# Altium footprint library TitansLib.PcbLib: 333 footprints (part 14 of 21)
Each footprint in its own frame and in the unit in brackets; x right, y up, seen from the top. Pads: shape width x height; smd on the part's side, far side on the other; paste and mask are expansions set on the pad; w line width, h text height; cw(c..) or ccw(c..) is an arc to the next point about the centre after c.
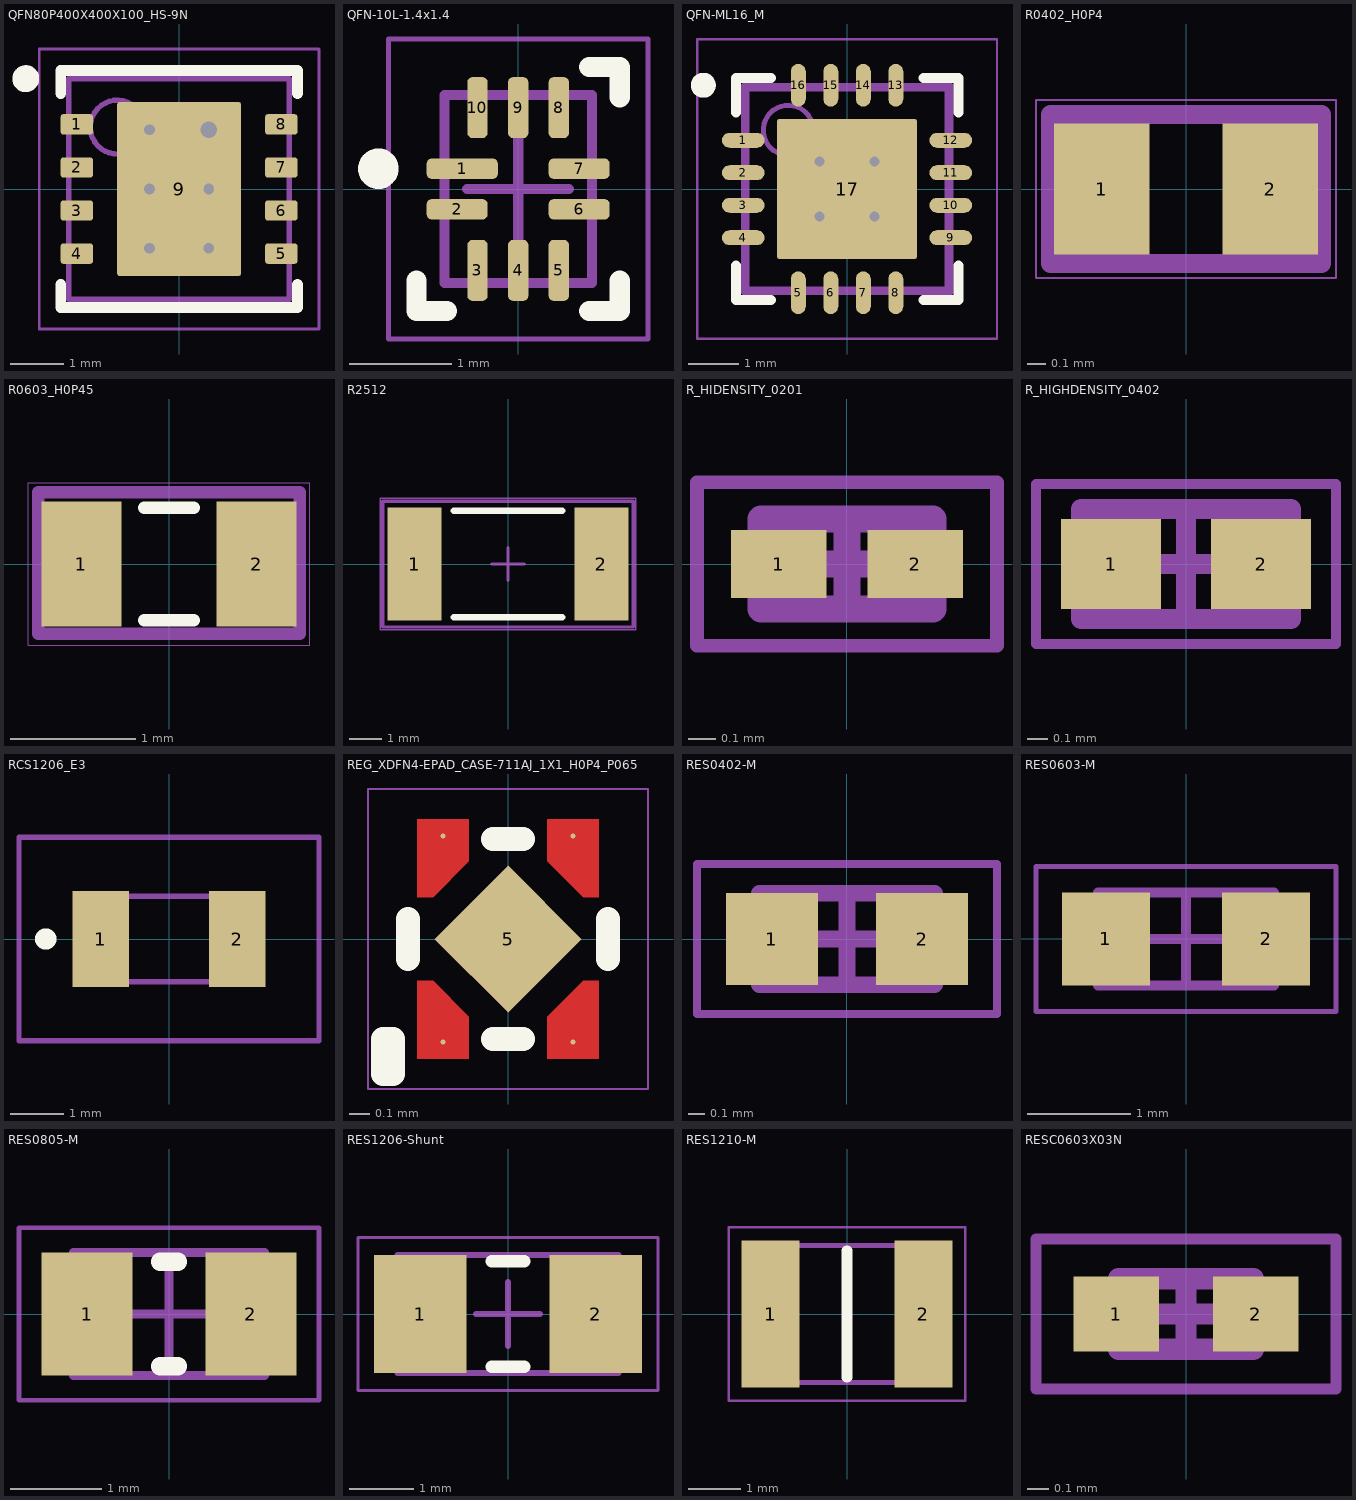
[diagram p13: the footprints below, top view; thin cyan lines are the x and y axes]

## QFN80P400X400X100_HS-9N [mm] "QFN, 8-Leads, Body 4.00x4.00mm, Pitch 0.80mm, Thermal Pad 2.18x3.03mm, IPC Medium Density"
height 1
pads (9):
  rrect26% 0.6x0.38 smd mask+0.05: 1(-1.9,1.2) 2(-1.9,0.4) 3(-1.9,-0.4) 4(-1.9,-1.2) 5(1.9,-1.2) 6(1.9,-0.4) 7(1.9,0.4) 8(1.9,1.2)
  rrect4% 2.3x3.24 smd mask+0.05: 9(0,0)
via 0.55,-1.1 diameter 0.4 hole 0.2
via -0.55,-1.1 diameter 0.4 hole 0.2
via 0.55,0 diameter 0.4 hole 0.2
via -0.55,0 diameter 0.4 hole 0.2
via 0.55,1.1 diameter 0.5 hole 0.3
via -0.55,1.1 diameter 0.4 hole 0.2
Top Overlay:
  circle w0.25: c-2.85,2.05 r0.125
  lines w0.2: -2.2,-1.775 -2.2,-2.2 2.2,-2.2 2.2,-1.775 ; -2.2,1.775 -2.2,2.2 2.2,2.2 2.2,1.775
Top Courtyard:
  lines w0.05: -2.6,-2.6 2.6,-2.6 2.6,2.6 -2.6,2.6 -2.6,-2.6
  lines w0.1: -0.5,0 0.5,0 ; 0,-0.5 0,0.5
Top Assembly:
  circle w0.1: c-1.15,1.15 r0.5
  lines w0.1: -2.05,-2.05 2.05,-2.05 2.05,2.05 -2.05,2.05 -2.05,-2.05
3D body "QFN80P400X400X100_HS-9N.step": height 1, standoff 0, extent -2.06,-2.05 2.06,2.05

## QFN-10L-1.4x1.4 [mm] "QFN, 10-Leads, Body 1.40x1.80mm, Pitch 0.40mm, IPC Medium Density"
height 0.55
pads (10):
  rrect50% 0.7x0.2 smd mask+0.05: 1(-0.55,0.2)
  rrect50% 0.6x0.2 smd mask+0.05: 2(-0.6,-0.2) 6(0.6,-0.2) 7(0.6,0.2)
  rrect50% 0.2x0.6 smd mask+0.05: 3(-0.4,-0.8) 4(0,-0.8) 5(0.4,-0.8) 8(0.4,0.8) 9(0,0.8) 10(-0.4,0.8)
Top Overlay:
  circle w0.2: c-1.375,0.2 r0.1
  lines w0.2: -1,-0.9 -1,-1.2 -0.7,-1.2 ; 0.7,-1.2 1,-1.2 1,-0.9 ; 0.7,1.2 1,1.2 1,0.9
Top Courtyard:
  lines w0.05: -1.275,-1.475 -1.275,1.475 1.275,1.475 1.275,-1.475 -1.275,-1.475
  lines w0.1: -0.5,0 0.5,0 ; 0,-0.5 0,0.5
Top Assembly:
  lines w0.1: -0.725,-0.925 -0.725,0.925 0.725,0.925 0.725,-0.925 -0.725,-0.925
  text ".Designator" at -0.621,-0.262 h1
3D body "QFN40P140X180X55-10N.step": height 0.55, standoff 0, extent -0.775,-0.975 0.775,0.975

## QFN-ML16_M [mm] "QFN, 16-Leads, Body 4x4mm, Pitch 0.65mm, Thermal Pad 2.8x2.8mm, IPC Low Density"
height 1
pads (17):
  oval 0.85x0.3 smd: 1(-2.075,0.975) 2(-2.075,0.325) 3(-2.075,-0.325) 4(-2.075,-0.975) 9(2.075,-0.975) 10(2.075,-0.325) 11(2.075,0.325) 12(2.075,0.975)
  oval 0.3x0.85 smd: 5(-0.975,-2.075) 6(-0.325,-2.075) 7(0.325,-2.075) 8(0.975,-2.075) 13(0.975,2.075) 14(0.325,2.075) 15(-0.325,2.075) 16(-0.975,2.075)
  rrect3% 2.8x2.8 smd: 17(0,0)
via 0.55,-0.55 diameter 0.5 hole 0.2
via -0.55,-0.55 diameter 0.5 hole 0.2
via 0.55,0.55 diameter 0.5 hole 0.2
via -0.55,0.55 diameter 0.5 hole 0.2
Top Overlay:
  circle w0.25: c-2.875,2.075 r0.125
  lines w0.2: -2.225,-1.525 -2.225,-2.225 -1.525,-2.225 ; -2.225,1.525 -2.225,2.225 -1.525,2.225 ; 1.525,-2.225 2.225,-2.225 2.225,-1.525 ; 1.525,2.225 2.225,2.225 2.225,1.525
Top Assembly:
  lines w0.1: -1.998,-1.998 -1.998,1.998 1.998,1.998 1.998,-1.998 -1.998,-1.998
  text ".Designator" at -1.662,-0.078 h1
Mechanical 13:
  circle w0.1: c-1.175,1.175 r0.5
  lines w0.1: -2.075,-2.075 2.075,-2.075 2.075,2.075 -2.075,2.075 -2.075,-2.075
Mechanical 15:
  lines w0.05: -3,-3 3,-3 3,3 -3,3 -3,-3
  lines w0.1: -0.5,0 0.5,0 ; 0,-0.5 0,0.5
3D body: height 1, standoff 0, extent -2.075,-2.075 2.075,2.075

## R0402_H0P4 [mm]
pads (2):
  rect 0.51x0.7 smd mask+0.05: 1(-0.45,0) 2(0.45,0)
Top Courtyard:
  lines w0.01: -0.8,-0.475 0.8,-0.475 0.8,0.475 -0.8,0.475 -0.8,-0.475
Top Assembly:
  lines w0.1: -0.723,-0.398 0.723,-0.398 0.723,0.398 -0.723,0.398 -0.723,-0.398
  text ".Designator" at -0.701,-0.277 h1
3D body "R0402.STEP": height 0.34, standoff 0, extent -0.52,-0.3 0.52,0.3

## R0603_H0P45 [mm]
pads (2):
  rect 0.64x1 smd mask+0.05: 1(-0.7,0) 2(0.7,0)
Top Overlay:
  lines w0.1: -0.2,-0.45 0.2,-0.45 ; -0.2,0.45 0.2,0.45
Top Courtyard:
  lines w0.01: -1.125,-0.65 -1.125,0.65 1.125,0.65 1.125,-0.65 -1.125,-0.65
Top Assembly:
  lines w0.1: -1.048,-0.557 -1.048,0.573 1.048,0.573 1.048,-0.557 -1.048,-0.557
  text ".Designator" at -0.912,-0.335 h1
3D body "R0603.STEP": height 0.56, standoff 0, extent -0.85,-0.4 0.85,0.4

## R2512 [mm] "Chip Resistor, 2-Leads, Body 6.35x3.18mm, IPC Medium Density"
height 0.89
pads (2):
  rect 1.65x3.45 smd: 1(-2.85,0) 2(2.85,0)
Top Overlay:
  lines w0.2: -1.65,-1.625 1.65,-1.625 ; -1.65,1.625 1.65,1.625
Top Courtyard:
  lines w0.05: -3.9,-2 3.9,-2 3.9,2 -3.9,2 -3.9,-2
  lines w0.1: -0.5,0 0.5,0 ; 0,-0.5 0,0.5
Top Assembly:
  lines w0.1: -3.823,-1.923 3.823,-1.923 3.823,1.91 -3.823,1.91 -3.823,-1.923
  text ".Designator" at -2.025,-0.205 h1
3D body "WSL2512 (0.007 to 0.5).stp": height 0.64, standoff 0, extent -3.175,-1.59 3.175,1.59

## R_HIDENSITY_0201 [mm]
height 0.26
pads (2):
  rect 0.35x0.25 smd: 1(-0.25,0) 2(0.25,0)
Top Courtyard:
  lines w0.05: -0.55,-0.3 -0.55,0.3 0.55,0.3 0.55,-0.3 -0.55,-0.3
  lines w0.1: -0.165,0 0.165,0 ; 0,-0.165 0,0.165
Top Assembly:
  lines w0.1: -0.315,-0.165 -0.315,0.165 0.315,0.165 0.315,-0.165 -0.315,-0.165
3D body "Chip2PinSM127P600-8N.step": height 0.26, standoff 0, extent -0.315,-0.165 0.315,0.165

## R_HIGHDENSITY_0402 [mm]
height 0.4
pads (2):
  rect 0.5x0.45 smd: 1(-0.375,0) 2(0.375,0)
Top Courtyard:
  lines w0.05: -0.75,-0.4 0.75,-0.4 0.75,0.4 -0.75,0.4 -0.75,-0.4
  lines w0.1: -0.275,0 0.275,0 ; 0,-0.275 0,0.275
Top Assembly:
  lines w0.1: -0.525,-0.275 0.525,-0.275 0.525,0.275 -0.525,0.275 -0.525,-0.275
3D body "R_HIGHDENSITY_0402.step": height 0.4, standoff 0, extent -0.525,-0.275 0.525,0.275

## RCS1206_E3 [mm]
pads (2):
  rect 1.05x1.8 smd: 1(-1.275,0) 2(1.275,0)
Top Overlay:
  lines w0.2: -2.3,-0.1 ccw(c-2.3,0) -2.3,0.1 ccw(c-2.3,0) -2.3,-0.1
Mechanical 13:
  lines w0.1: -1.575,-0.8 -1.575,0.8 1.575,0.8 1.575,-0.8 -1.575,-0.8
Mechanical 15:
  lines w0.1: -2.8,-1.9 -2.8,1.9 2.8,1.9 2.8,-1.9 -2.8,-1.9
3D body "RCS120639R0FKEA.stp": height 0.55, standoff 0, extent -1.6,-0.8 1.6,0.8

## REG_XDFN4-EPAD_CASE-711AJ_1X1_H0P4_P065 [mm] "MCD-01613"
height 0.43
pads (5):
  round 0.025 smd paste+0 mask+0.038: 1(-0.325,-0.515) 2(0.325,-0.515) 3(0.325,0.515) 4(-0.325,0.515)
  rect 0.52x0.52 smd rot 45 paste+0 mask+0.038: 5(0,0)
Top Layer:
  region: -0.455,0.6 -0.195,0.6 -0.195,0.39 -0.375,0.21 -0.455,0.21
  region: 0.455,0.6 0.195,0.6 0.195,0.39 0.375,0.21 0.455,0.21
  region: 0.455,-0.6 0.195,-0.6 0.195,-0.39 0.375,-0.21 0.455,-0.21
  region: -0.455,-0.6 -0.195,-0.6 -0.195,-0.39 -0.375,-0.21 -0.455,-0.21
Top Overlay:
  lines w0.12: -0.5,-0.1 -0.5,0.1 ; -0.075,-0.5 0.075,-0.5 ; -0.075,0.5 0.075,0.5 ; 0.5,-0.1 0.5,0.1 ; -0.625,-0.675 -0.575,-0.675 -0.575,-0.5 -0.625,-0.5 -0.625,-0.675
Top Courtyard:
  lines w0.01: -0.7,-0.75 -0.7,0.75 0.7,0.75 0.7,-0.75 -0.7,-0.75
3D body: height 0.43, standoff 0, extent -0.5,-0.5 0.5,0.5
3D body "XDFN4-711AJ.STEP": height 0.36, standoff -0.03, extent -0.5,-0.502 0.5,0.502
3D body: height 0.37, standoff 0.36, extent -0.47,-0.47 -0.23,-0.23
3D body: height 0.44, standoff 0.43, extent -0.445,-0.445 -0.205,-0.205

## RES0402-M [mm] "Chip Resistor, 2-Leads, Body 1.00x0.50mm, IPC Medium Density"
height 0.35
pads (2):
  rect 0.55x0.55 smd mask+0.051: 1(-0.45,0) 2(0.45,0)
Top Courtyard:
  lines w0.05: -0.9,-0.45 -0.9,0.45 0.9,0.45 0.9,-0.45 -0.9,-0.45
  lines w0.1: -0.275,0 0.275,0 ; 0,-0.275 0,0.275
Top Designator:
  text ".Designator" at -4.818,-0.496 h2.5
Mechanical 13:
  lines w0.1: -0.525,-0.275 -0.525,0.275 0.525,0.275 0.525,-0.275 -0.525,-0.275
3D body "RES0402-M.step": height 0.35, standoff 0, extent -0.525,-0.275 0.525,0.275

## RES0603-M [mm] "Chip Resistor, 2-Leads, Body 1.60x0.80mm, IPC Medium Density"
height 0.45
pads (2):
  rect 0.85x0.9 smd mask+0.051: 1(-0.775,0) 2(0.775,0)
Top Courtyard:
  lines w0.05: -1.45,-0.7 1.45,-0.7 1.45,0.7 -1.45,0.7 -1.45,-0.7
  lines w0.1: -0.45,0 0.45,0 ; 0,-0.45 0,0.45
Mechanical 13:
  lines w0.1: -0.85,-0.45 0.85,-0.45 0.85,0.45 -0.85,0.45 -0.85,-0.45
3D body "RES0603-M.step": height 0.45, standoff 0, extent -0.85,-0.45 0.85,0.45

## RES0805-M [mm] "Chip Resistor, 2-Leads, Body 2.00x1.25mm, IPC Medium Density"
height 0.6
pads (2):
  rect 1x1.35 smd mask+0.05: 1(-0.9,0) 2(0.9,0)
Top Overlay:
  lines w0.2: -0.1,-0.575 0.1,-0.575 ; -0.1,0.575 0.1,0.575
Top Courtyard:
  lines w0.05: -1.65,-0.95 1.65,-0.95 1.65,0.95 -1.65,0.95 -1.65,-0.95
  lines w0.1: -0.5,0 0.5,0 ; 0,-0.5 0,0.5
Top Assembly:
  lines w0.1: -1.05,-0.675 1.05,-0.675 1.05,0.675 -1.05,0.675 -1.05,-0.675
3D body "RESC2012X06N.step": height 0.6, standoff 0, extent -1.05,-0.675 1.05,0.675

## RES1206-Shunt [mm] "Chip Resistor, 2-Leads, Body 3.20x1.60mm, IPC Medium Density"
height 0.85
pads (2):
  rect 1.45x1.85 smd mask+0.05: 1(-1.375,0) 2(1.375,0)
Top Overlay:
  lines w0.2: -0.25,-0.825 0.25,-0.825 ; -0.25,0.825 0.25,0.825
Top Courtyard:
  lines w0.05: -2.35,-1.2 2.35,-1.2 2.35,1.2 -2.35,1.2 -2.35,-1.2
  lines w0.1: -0.5,0 0.5,0 ; 0,-0.5 0,0.5
Top Assembly:
  lines w0.1: -1.725,-0.925 1.725,-0.925 1.725,0.925 -1.725,0.925 -1.725,-0.925
3D body "RESC3216X08N.step": height 0.85, standoff 0, extent -1.725,-0.925 1.725,0.925

## RES1210-M [mm]
pads (2):
  rect 1.1x2.8 smd: 1(-1.45,0) 2(1.45,0)
Top Overlay:
  lines w0.2: 0,-1.2 0,1.2
Mechanical 13:
  lines w0.1: -1.55,-1.3 -1.55,1.3 1.55,1.3 1.55,-1.3 -1.55,-1.3
Mechanical 15:
  lines w0.05: -2.25,-1.65 -2.25,1.65 2.25,1.65 2.25,-1.65 -2.25,-1.65
3D body "RC1210FR-07100RL.stp": height 0.65, standoff 0, extent -1.55,-1.3 1.55,1.3

## RESC0603X03N [mm] "Chip Resistor, 2-Leads, Body 0.60x0.30mm, IPC Medium Density"
height 0.26
pads (2):
  rect 0.4x0.35 smd mask+0.05: 1(-0.325,0) 2(0.325,0)
Top Courtyard:
  lines w0.05: -0.7,-0.35 0.7,-0.35 0.7,0.35 -0.7,0.35 -0.7,-0.35
  lines w0.1: -0.165,0 0.165,0 ; 0,-0.165 0,0.165
Top Assembly:
  lines w0.1: -0.315,-0.165 0.315,-0.165 0.315,0.165 -0.315,0.165 -0.315,-0.165
3D body "RESC0603X03N.step": height 0.26, standoff 0, extent -0.315,-0.165 0.315,0.165